# Altium footprint library Miscellaneous Devices.PcbLib: 306 footprints (part 14 of 20)
Each footprint in its own frame and in the unit in brackets; x right, y up, seen from the top. Pads: shape width x height; smd on the part's side, far side on the other; paste and mask are expansions set on the pad; w line width, h text height; cw(c..) or ccw(c..) is an arc to the next point about the centre after c.
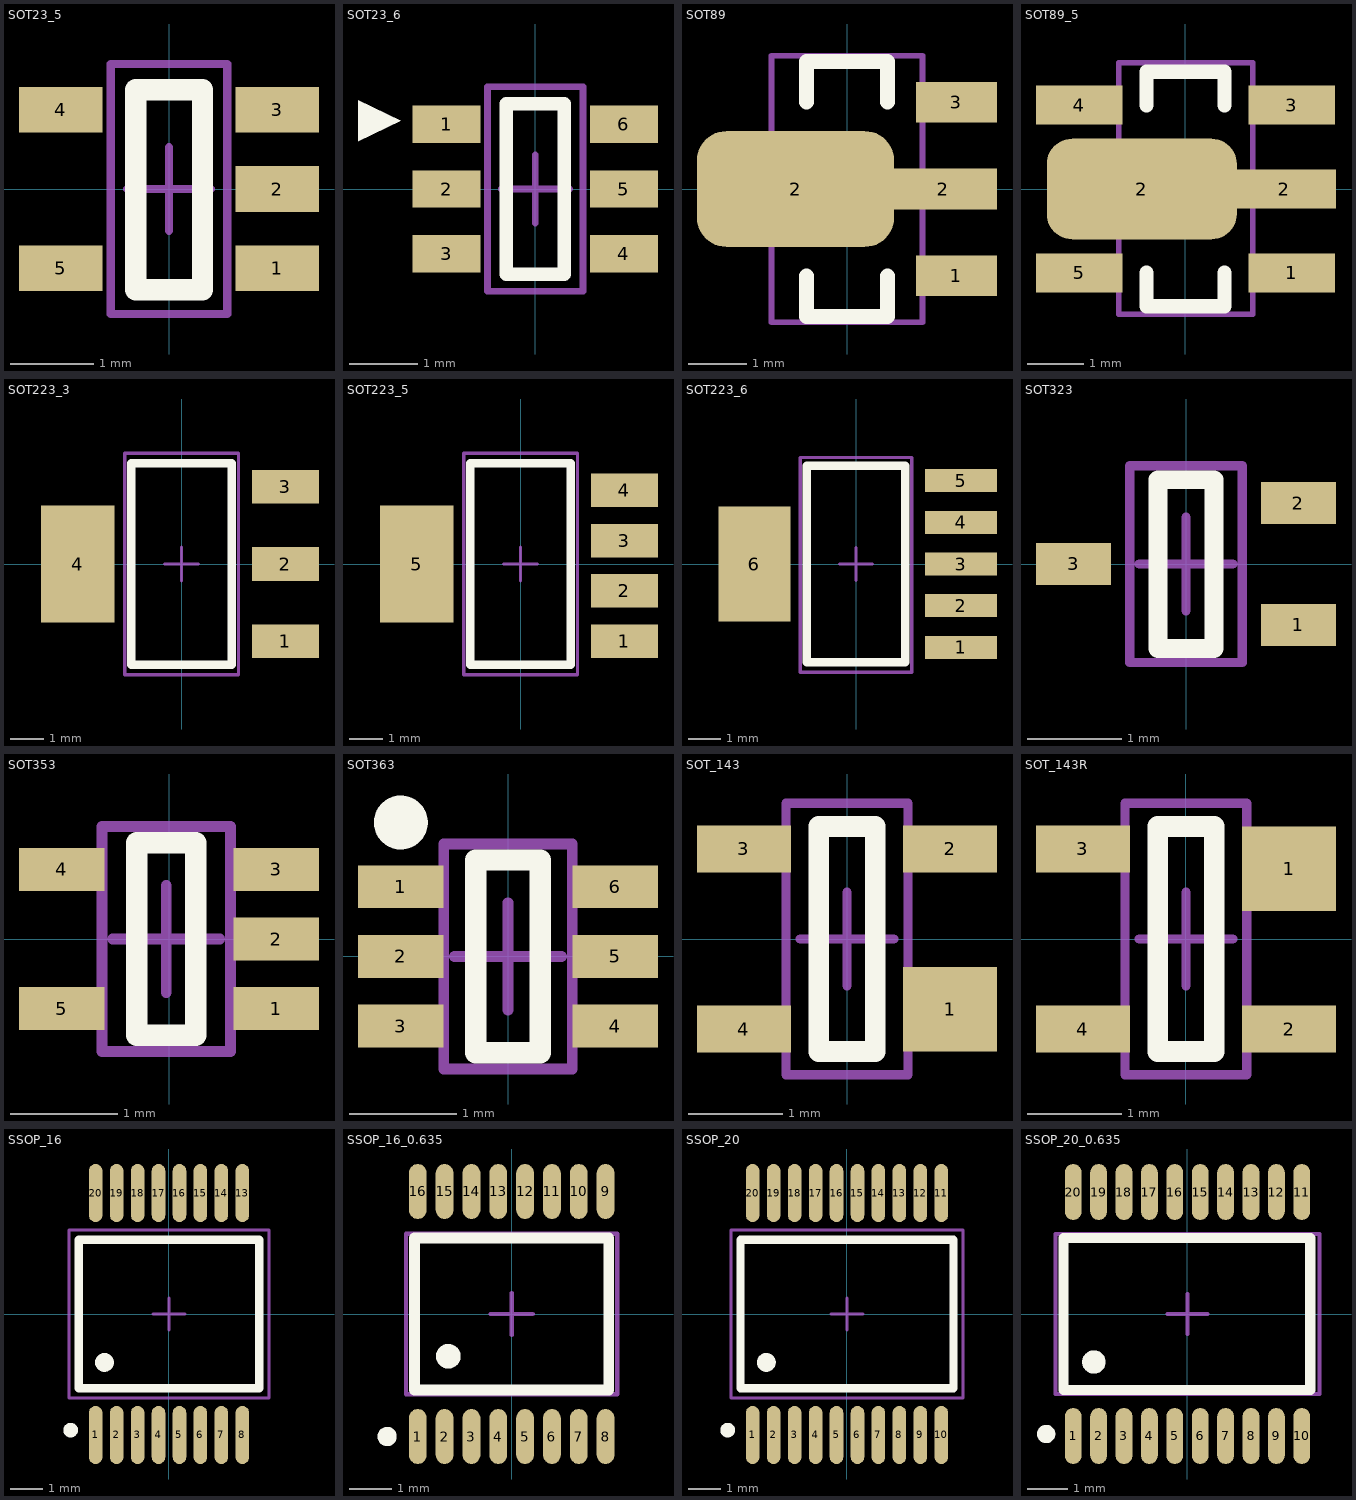
[diagram p13: the footprints below, top view; thin cyan lines are the x and y axes]

## SOT23_5 [mm]
pads (5):
  rect 1x0.55 smd: 1(1.3,-0.95) 2(1.3,0) 3(1.3,0.95) 4(-1.3,0.95) 5(-1.3,-0.95)
Top Overlay:
  lines w0.254: -0.4,-1.21 0.4,-1.21 0.4,1.19 -0.4,1.19 -0.4,-1.21
Mechanical 15:
  lines w0.1: -0.5,0 0.5,0 ; 0,-0.5 0,0.5 ; -0.7,-1.5 -0.7,1.5 0.7,1.5 0.7,-1.5 -0.7,-1.5
3D body: height 1.3, standoff 0, extent -1.516,-1.51 1.484,1.49

## SOT23_6 [mm]
pads (6):
  rect 1x0.55 smd: 1(-1.3,0.95) 2(-1.3,0) 3(-1.3,-0.95) 4(1.3,-0.95) 5(1.3,0) 6(1.3,0.95)
Top Overlay:
  region: -1.975,1 -2.6,1.3 -2.6,0.7
  lines w0.2: -0.425,-1.25 -0.425,1.25 0.425,1.25 0.425,-1.25 -0.425,-1.25
Mechanical 15:
  lines w0.1: -0.5,0 0.5,0 ; 0,-0.5 0,0.5 ; -0.7,-1.5 -0.7,1.5 0.7,1.5 0.7,-1.5 -0.7,-1.5
3D body: height 1.45, standoff 0, extent -1.4,-1.45 1.4,1.45

## SOT89 [mm]
pads (4):
  rect 1.4x0.7 smd: 1(1.887,-1.5) 3(1.887,1.5)
  rrect50% 3.4x2 smd: 2(-0.888,0)
  rect 1.85x0.7 smd: 2(1.662,0)
Top Overlay:
  lines w0.254: -0.7,-1.5 -0.7,-2.2 0.7,-2.2 0.7,-1.5 ; -0.7,1.5 -0.7,2.2 0.7,2.2 0.7,1.5
Mechanical 15:
  lines w0.1: -1.3,-2.3 -1.3,2.3 1.3,2.3 1.3,-2.3 -1.3,-2.3
3D body: height 1.62, standoff 0.01, extent -2.077,-2.317 2.173,2.283

## SOT89_5 [mm]
pads (6):
  rect 1.55x0.7 smd: 1(1.9,-1.5) 3(1.9,1.5) 4(-1.9,1.5) 5(-1.9,-1.5)
  rrect50% 3.4x1.8 smd: 2(-0.781,0)
  rect 1.85x0.7 smd: 2(1.769,0)
Top Overlay:
  lines w0.254: -0.7,-1.5 -0.7,-2.1 0.7,-2.1 0.7,-1.5 ; -0.7,1.5 -0.7,2.1 0.7,2.1 0.7,1.5
Mechanical 15:
  lines w0.1: -1.194,-2.24 1.206,-2.24 1.206,2.26 -1.194,2.26 -1.194,-2.24
3D body: height 1.54, standoff 0, extent -2.26,-2.24 2.24,2.26

## SOT223_3 [mm]
pads (4):
  rect 2x1 smd: 1(3.1,-2.3) 2(3.1,0) 3(3.1,2.3)
  rect 2.2x3.5 smd: 4(-3.1,0)
Top Overlay:
  lines w0.254: -1.5,-3 1.5,-3 1.5,3 -1.5,3 -1.5,-3
Mechanical 15:
  lines w0.1: -0.5,0 0.5,0 ; 0,-0.5 0,0.5 ; -1.7,-3.3 -1.7,3.3 1.7,3.3 1.7,-3.3 -1.7,-3.3
3D body: height 1.64, standoff -0.01, extent -3.5,-3.25 3.5,3.25

## SOT223_5 [mm]
pads (5):
  rect 2x1 smd: 1(3.1,-2.3) 2(3.1,-0.8) 3(3.1,0.7) 4(3.1,2.2)
  rect 2.2x3.5 smd: 5(-3.1,0)
Top Overlay:
  lines w0.254: -1.5,-3 1.5,-3 1.5,3 -1.5,3 -1.5,-3
Mechanical 15:
  lines w0.1: -0.5,0 0.5,0 ; 0,-0.5 0,0.5 ; -1.7,-3.3 -1.7,3.3 1.7,3.3 1.7,-3.3 -1.7,-3.3
3D body: height 1.64, standoff -0.01, extent -3.5,-3.25 3.5,3.25

## SOT223_6 [mm]
pads (6):
  rect 2.2x0.7 smd: 1(3.2,-2.54) 2(3.2,-1.27) 3(3.2,0) 4(3.2,1.27) 5(3.2,2.54)
  rect 2.2x3.5 smd: 6(-3.1,0)
Top Overlay:
  lines w0.254: -1.5,-3 1.5,-3 1.5,3 -1.5,3 -1.5,-3
Mechanical 15:
  lines w0.1: -0.5,0 0.5,0 ; 0,-0.5 0,0.5 ; -1.7,-3.3 -1.7,3.25 1.7,3.25 1.7,-3.3 -1.7,-3.3
3D body: height 1.8, standoff 0, extent -3.6,-3.3 3.66,3.25

## SOT323 [mm]
pads (3):
  rect 0.8x0.45 smd: 1(1.2,-0.65) 2(1.2,0.65) 3(-1.2,0)
Top Overlay:
  lines w0.2: -0.3,-0.9 0.3,-0.9 0.3,0.9 -0.3,0.9 -0.3,-0.9
Mechanical 15:
  lines w0.1: -0.5,0 0.5,0 ; 0,-0.5 0,0.5 ; -0.6,-1.05 -0.6,1.05 0.6,1.05 0.6,-1.05 -0.6,-1.05
3D body: height 0.9, standoff 0, extent -1.05,-1.05 1.05,1.05

## SOT353 [mm]
pads (5):
  rect 0.8x0.4 smd: 1(1,-0.65) 2(1,0) 3(1,0.65) 4(-1,0.65) 5(-1,-0.65)
Top Overlay:
  lines w0.2: -0.3,-0.9 -0.3,0.9 0.25,0.9 0.25,-0.9 -0.3,-0.9
Mechanical 15:
  lines w0.1: -0.525,0 0.475,0 ; -0.025,-0.5 -0.025,0.5 ; -0.625,-1.05 -0.625,1.05 0.575,1.05 0.575,-1.05 -0.625,-1.05
3D body: height 1, standoff 0, extent -1.145,-1.05 1.155,1.05

## SOT363 [mm]
pads (6):
  rect 0.8x0.4 smd: 1(-1,0.65) 2(-1,0) 3(-1,-0.65) 4(1,-0.65) 5(1,0) 6(1,0.65)
Top Overlay:
  circle w0.254: c-1,1.25 r0.125
  lines w0.2: -0.3,-0.9 0.3,-0.9 0.3,0.9 -0.3,0.9 -0.3,-0.9
Mechanical 15:
  lines w0.1: -0.5,0 0.5,0 ; 0,-0.5 0,0.5 ; -0.6,-1.05 0.6,-1.05 0.6,1.05 -0.6,1.05 -0.6,-1.05
3D body: height 0.95, standoff -0.04, extent -1.07,-1 1.03,1

## SOT_143 [mm]
pads (4):
  rect 1x0.9 smd: 1(1.1,-0.75)
  rect 1x0.5 smd: 2(1.1,0.96) 3(-1.1,0.96) 4(-1.1,-0.96)
Top Overlay:
  lines w0.22: -0.3,-1.2 -0.3,1.2 0.3,1.2 0.3,-1.2 -0.3,-1.2
Mechanical 15:
  lines w0.1: -0.5,0 0.5,0 ; 0,-0.5 0,0.5 ; -0.65,-1.45 0.65,-1.45 0.65,1.45 -0.65,1.45 -0.65,-1.45
3D body: height 1, standoff 0, extent -1.22,-1.46 1.2,1.46

## SOT_143R [mm]
pads (4):
  rect 1x0.9 smd: 1(1.1,0.75)
  rect 1x0.5 smd: 2(1.1,-0.96) 3(-1.1,0.96) 4(-1.1,-0.96)
Top Overlay:
  lines w0.22: -0.3,-1.2 0.3,-1.2 0.3,1.2 -0.3,1.2 -0.3,-1.2
Mechanical 15:
  lines w0.1: -0.5,0 0.5,0 ; 0,-0.5 0,0.5 ; -0.65,-1.45 -0.65,1.45 0.65,1.45 0.65,-1.45 -0.65,-1.45
3D body: height 0.95, standoff 0.02, extent -1.25,-1.45 1.25,1.45

## SSOP_16 [mm] "0.65"
pads (16):
  oval 0.42x1.8 smd: 1(-2.275,-3.75) 2(-1.625,-3.75) 3(-0.975,-3.75) 4(-0.325,-3.75) 5(0.325,-3.75) 6(0.975,-3.75) 7(1.625,-3.75) 8(2.275,-3.75) 13(2.275,3.75) 14(1.625,3.75) 15(0.975,3.75) 16(0.325,3.75) 17(-0.325,3.75) 18(-0.975,3.75) 19(-1.625,3.75) 20(-2.275,3.75)
Top Overlay:
  circle w0.3: c-2,-1.5 r0.141
  circle w0.254: c-3.05,-3.6 r0.1
  lines w0.254: -2.8,-2.3 2.8,-2.3 2.8,2.3 -2.8,2.3 -2.8,-2.3
Mechanical 15:
  lines w0.1: -0.5,0 0.5,0 ; 0,-0.5 0,0.5 ; -3.1,-2.6 -3.1,2.6 3.1,2.6 3.1,-2.6 -3.1,-2.6
3D body: height 1.9, standoff 0, extent -3.1,-3.9 3.1,3.9

## SSOP_16_0.635 [mm]
pads (16):
  oval 0.42x1.3 smd: 1(-2.222,-2.9) 2(-1.587,-2.9) 3(-0.953,-2.9) 4(-0.318,-2.9) 5(0.318,-2.9) 6(0.953,-2.9) 7(1.587,-2.9) 8(2.222,-2.9) 9(2.222,2.9) 10(1.587,2.9) 11(0.953,2.9) 12(0.318,2.9) 13(-0.318,2.9) 14(-0.953,2.9) 15(-1.587,2.9) 16(-2.222,2.9)
Top Overlay:
  circle w0.254: c-2.947,-2.9 r0.1
  circle w0.3: c-1.5,-1 r0.141
  lines w0.254: -2.3,-1.8 2.3,-1.8 2.3,1.8 -2.3,1.8 -2.3,-1.8
Mechanical 15:
  lines w0.1: -0.5,0 0.5,0 ; 0,-0.5 0,0.5 ; -2.5,-1.9 2.5,-1.9 2.5,1.9 -2.5,1.9 -2.5,-1.9
3D body: height 1.1, standoff 0, extent -2.512,-3 2.467,2.994

## SSOP_20 [mm] "0.65"
pads (20):
  oval 0.42x1.8 smd: 1(-2.925,-3.75) 2(-2.275,-3.75) 3(-1.625,-3.75) 4(-0.975,-3.75) 5(-0.325,-3.75) 6(0.325,-3.75) 7(0.975,-3.75) 8(1.625,-3.75) 9(2.275,-3.75) 10(2.925,-3.75) 11(2.925,3.75) 12(2.275,3.75) 13(1.625,3.75) 14(0.975,3.75) 15(0.325,3.75) 16(-0.325,3.75) 17(-0.975,3.75) 18(-1.625,3.75) 19(-2.275,3.75) 20(-2.925,3.75)
Top Overlay:
  circle w0.254: c-3.7,-3.6 r0.1
  circle w0.3: c-2.5,-1.5 r0.141
  lines w0.254: -3.3,-2.3 3.3,-2.3 3.3,2.3 -3.3,2.3 -3.3,-2.3
Mechanical 15:
  lines w0.1: -0.5,0 0.5,0 ; 0,-0.5 0,0.5 ; -3.6,-2.6 -3.6,2.6 3.6,2.6 3.6,-2.6 -3.6,-2.6
3D body: height 1.9, standoff 0, extent -3.6,-3.9 3.6,3.9

## SSOP_20_0.635 [mm]
pads (20):
  oval 0.42x1.4 smd: 1(-2.857,-3.05) 2(-2.222,-3.05) 3(-1.587,-3.05) 4(-0.953,-3.05) 5(-0.318,-3.05) 6(0.318,-3.05) 7(0.953,-3.05) 8(1.587,-3.05) 9(2.222,-3.05) 10(2.857,-3.05) 11(2.857,3.05) 12(2.222,3.05) 13(1.587,3.05) 14(0.953,3.05) 15(0.318,3.05) 16(-0.318,3.05) 17(-0.953,3.05) 18(-1.587,3.05) 19(-2.222,3.05) 20(-2.857,3.05)
Top Overlay:
  circle w0.254: c-3.532,-3 r0.1
  circle w0.3: c-2.341,-1.2 r0.141
  lines w0.254: -3.1,-1.9 -3.1,1.9 3.067,1.9 3.067,-1.9 -3.1,-1.9
Mechanical 15:
  lines w0.1: -0.5,0 0.5,0 ; 0,-0.5 0,0.5 ; -3.3,-2 -3.3,2 3.3,2 3.3,-2 -3.3,-2
3D body: height 1.2, standoff 0, extent -3.25,-3.2 3.25,3.2